# Altium footprint library WR-PHD_Socket Header_2.54mm.PcbLib: 187 footprints (part 4 of 12)
Each footprint in its own frame and in the unit in brackets; x right, y up, seen from the top. Pads: shape width x height; smd on the part's side, far side on the other; paste and mask are expansions set on the pad; w line width, h text height; cw(c..) or ccw(c..) is an arc to the next point about the centre after c.
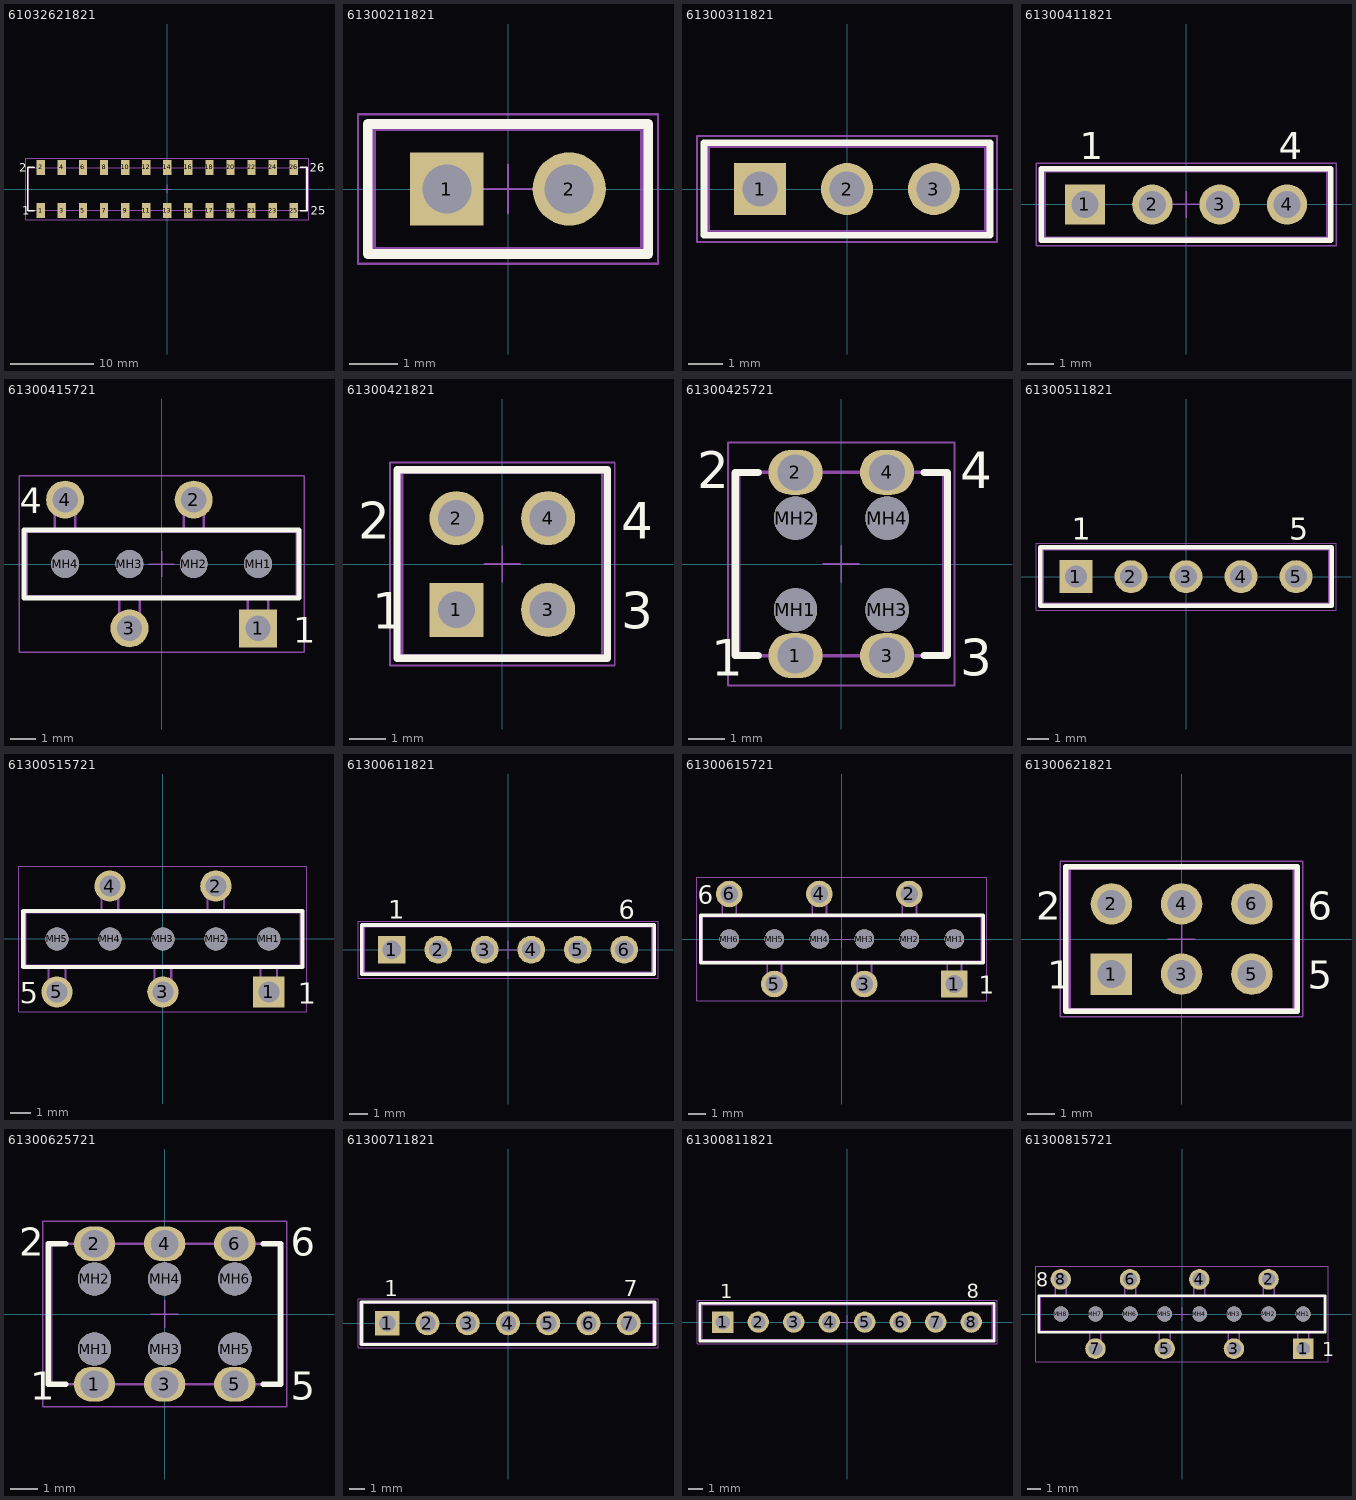
[diagram p3: the footprints below, top view; thin cyan lines are the x and y axes]

## 61032621821 [mm] "Socket Header, Pitch 2.54 mm, SMT, Vertical, dual row, 26p"
height 7.45
pads (26):
  rect 1x1.8 smd: 1(-15.24,-2.6) 2(-15.24,2.6) 3(-12.7,-2.6) 4(-12.7,2.6) 5(-10.16,-2.6) 6(-10.16,2.6) 7(-7.62,-2.6) 8(-7.62,2.6) 9(-5.08,-2.6) 10(-5.08,2.6) 11(-2.54,-2.6) 12(-2.54,2.6) 13(0,-2.6) 14(0,2.6) 15(2.54,-2.6) 16(2.54,2.6) 17(5.08,-2.6) 18(5.08,2.6) 19(7.62,-2.6) 20(7.62,2.6) 21(10.16,-2.6) 22(10.16,2.6) 23(12.7,-2.6) 24(12.7,2.6) 25(15.24,-2.6) 26(15.24,2.6)
Top Overlay:
  lines w0.2: -16.02,-2.615 -16.835,-2.615 -16.835,2.615 -16.02,2.615 ; 16.02,-2.615 16.835,-2.615 16.835,2.615 16.02,2.615
  text "2" at -17.87,2.1 h1.02
  text "1" at -17.47,-3.1 h1.02
  text "25" at 17.27,-3.1 h1.02
  text "26" at 17.17,2.1 h1.02
Mechanical 13:
  lines w0.1: -15.56,-2.54 -15.56,-3.35 -14.92,-3.35 -14.92,-2.54 ; -15.56,2.54 -15.56,3.35 -14.92,3.35 -14.92,2.54 ; -13.02,-2.54 -13.02,-3.35 -12.38,-3.35 -12.38,-2.54 ; -13.02,2.54 -13.02,3.35 -12.38,3.35 -12.38,2.54 ; -10.48,-2.54 -10.48,-3.35 -9.84,-3.35 -9.84,-2.54 ; -10.48,2.54 -10.48,3.35 -9.84,3.35 -9.84,2.54 ; -7.94,-2.54 -7.94,-3.35 -7.3,-3.35 -7.3,-2.54 ; -7.94,2.54 -7.94,3.35 -7.3,3.35 -7.3,2.54 ; -5.4,-2.54 -5.4,-3.35 -4.76,-3.35 -4.76,-2.54 ; -5.4,2.54 -5.4,3.35 -4.76,3.35 -4.76,2.54 ; -2.86,-2.54 -2.86,-3.35 -2.22,-3.35 -2.22,-2.54 ; -2.86,2.54 -2.86,3.35 -2.22,3.35 -2.22,2.54 ; -0.32,-2.54 -0.32,-3.35 0.32,-3.35 0.32,-2.54 ; -0.32,2.54 -0.32,3.35 0.32,3.35 0.32,2.54 ; 2.22,-2.54 2.22,-3.35 2.86,-3.35 2.86,-2.54 ; 2.22,2.54 2.22,3.35 2.86,3.35 2.86,2.54 ; 4.76,-2.54 4.76,-3.35 5.4,-3.35 5.4,-2.54 ; 4.76,2.54 4.76,3.35 5.4,3.35 5.4,2.54 ; 7.3,-2.54 7.3,-3.35 7.94,-3.35 7.94,-2.54 ; 7.3,2.54 7.3,3.35 7.94,3.35 7.94,2.54 ; 9.84,-2.54 9.84,-3.35 10.48,-3.35 10.48,-2.54 ; 9.84,2.54 9.84,3.35 10.48,3.35 10.48,2.54 ; 12.38,-2.54 12.38,-3.35 13.02,-3.35 13.02,-2.54 ; 12.38,2.54 12.38,3.35 13.02,3.35 13.02,2.54 ; 14.92,-2.54 14.92,-3.35 15.56,-3.35 15.56,-2.54 ; 14.92,2.54 14.92,3.35 15.56,3.35 15.56,2.54 ; -16.76,-2.54 -16.76,2.54 16.76,2.54 16.76,-2.54 -16.76,-2.54
Mechanical 15:
  lines w0.05: -0.5,0 0.5,0 ; 0,-0.5 0,0.5 ; -17.035,-3.7 17.035,-3.7 17.035,3.7 -17.035,3.7 -17.035,-3.7
3D body "61032621821.stp": height 8.52, standoff 0.02, extent -16.51,-3.35 16.51,3.35

## 61300211821 [mm] "Socket Header, Pitch 2.54 mm, THT, Vertical, single row, 2p"
height 8.5
pads (2):
  rect 1.52x1.52 hole 1.02: 1(-1.27,0)
  round 1.52 hole 1.02: 2(1.27,0)
Top Overlay:
  lines w0.2: -2.915,-1.35 -2.915,1.35 2.915,1.35 2.915,-1.35 -2.915,-1.35
Mechanical 13:
  lines w0.1: -2.79,-1.25 -2.79,1.25 2.79,1.25 2.79,-1.25 -2.79,-1.25
Mechanical 15:
  lines w0.05: -0.5,0 0.5,0 ; 0,-0.5 0,0.5 ; -3.115,-1.55 -3.115,1.55 3.115,1.55 3.115,-1.55 -3.115,-1.55
3D body "61300211821.stp": height 8.55, standoff -3.06, extent -2.79,-1.25 2.79,1.25

## 61300311821 [mm] "Socket Header, Pitch 2.54 mm, THT, Vertical, single row, 3p"
height 8.5
pads (3):
  rect 1.52x1.52 hole 1.02: 1(-2.54,0)
  round 1.52 hole 1.02: 2(0,0) 3(2.54,0)
Top Overlay:
  lines w0.2: -4.185,-1.35 -4.185,1.35 4.185,1.35 4.185,-1.35 -4.185,-1.35
Mechanical 13:
  lines w0.1: -4.06,-1.25 -4.06,1.25 4.06,1.25 4.06,-1.25 -4.06,-1.25
Mechanical 15:
  lines w0.05: -0.5,0 0.5,0 ; 0,-0.5 0,0.5 ; -4.385,-1.55 -4.385,1.55 4.385,1.55 4.385,-1.55 -4.385,-1.55
3D body "61300311821.stp": height 8.55, standoff -3.06, extent -4.06,-1.25 4.06,1.25

## 61300411821 [mm] "Socket Header, Pitch 2.54 mm, THT, Vertical, single row, 4p"
height 8.5
pads (4):
  rect 1.52x1.52 hole 1.02: 1(-3.81,0)
  round 1.52 hole 1.02: 2(-1.27,0) 3(1.27,0) 4(3.81,0)
Top Overlay:
  lines w0.2: -5.455,-1.35 5.455,-1.35 5.455,1.35 -5.455,1.35 -5.455,-1.35
  text "4" at 3.5,1.7 h1.02
  text "1" at -4,1.7 h1.02
Mechanical 13:
  lines w0.1: -5.33,-1.25 5.33,-1.25 5.33,1.25 -5.33,1.25 -5.33,-1.25
Mechanical 15:
  lines w0.05: -0.5,0 0.5,0 ; 0,-0.5 0,0.5 ; -5.655,-1.55 5.655,-1.55 5.655,1.55 -5.655,1.55 -5.655,-1.55
3D body "61300411821.stp": height 8.55, standoff -3.05, extent -5.33,-1.25 5.33,1.25

## 61300415721 [mm] "Socket Header, Pitch 2.54 mm, THT, Vertical, single row, 4p"
height 5
pads (8):
  rect 1.5x1.5 hole 1: 1(3.81,-2.54)
  round 1.5 hole 1: 2(1.27,2.54) 3(-1.27,-2.54) 4(-3.81,2.54)
  round 1.1 hole 1.1 unplated: MH1(3.81,0) MH2(1.27,0) MH3(-1.27,0) MH4(-3.81,0)
Top Overlay:
  lines w0.2: -5.43,-1.345 -5.43,1.345 5.43,1.345 5.43,-1.345 -5.43,-1.345
  text "4" at -5.6,2 h1.02
  text "1" at 5.2,-3.1 h1.02
Mechanical 13:
  lines w0.1: -4.21,1.27 -4.21,2.665 -3.41,2.665 -3.41,1.27 ; -1.67,-1.27 -1.67,-2.665 -0.87,-2.665 -0.87,-1.27 ; 0.87,1.27 0.87,2.665 1.67,2.665 1.67,1.27 ; 3.41,-1.27 3.41,-2.665 4.21,-2.665 4.21,-1.27 ; -5.33,-1.27 -5.33,1.27 5.33,1.27 5.33,-1.27 -5.33,-1.27
Mechanical 15:
  lines w0.05: -0.5,0 0.5,0 ; 0,-0.5 0,0.5 ; -5.63,-3.49 5.63,-3.49 5.63,3.49 -5.63,3.49 -5.63,-3.49
3D body "61300415721.stp": height 5.17, standoff -2.93, extent -5.38,-2.665 5.38,2.665

## 61300421821 [mm] "Socket Header, Pitch 2.54 mm, THT, Vertical, dual row, 4p"
height 8.4
pads (4):
  rect 1.5x1.5 hole 1.02: 1(-1.27,-1.27)
  round 1.5 hole 1.02: 2(-1.27,1.27) 3(1.27,-1.27) 4(1.27,1.27)
Top Overlay:
  lines w0.2: -2.915,-2.615 -2.915,2.615 2.915,2.615 2.915,-2.615 -2.915,-2.615
  text "4" at 3.3,0.7 h1.02
  text "2" at -4,0.7 h1.02
  text "3" at 3.3,-1.8 h1.02
  text "1" at -3.6,-1.8 h1.02
Mechanical 13:
  lines w0.1: -2.79,-2.54 2.79,-2.54 2.79,2.54 -2.79,2.54 -2.79,-2.54
Mechanical 15:
  lines w0.05: -0.5,0 0.5,0 ; 0,-0.5 0,0.5 ; -3.115,-2.815 3.115,-2.815 3.115,2.815 -3.115,2.815 -3.115,-2.815
3D body "61300421821.stp": height 8.45, standoff -3.05, extent -2.79,-2.54 2.79,2.54

## 61300425721 [mm] "Dual Socket Header Bottom Entry, pitch 2.54mm, 4p"
height 5
pads (8):
  oval 1.5x1.25 hole 1: 1(-1.27,-2.54) 2(-1.27,2.54) 3(1.27,-2.54) 4(1.27,2.54)
  round 1.2 hole 1.2 unplated: MH1(-1.27,-1.27) MH2(-1.27,1.27) MH3(1.27,-1.27) MH4(1.27,1.27)
Top Overlay:
  lines w0.2: -2.3,-2.54 -2.94,-2.54 -2.94,2.54 -2.3,2.54 ; 2.3,-2.54 2.94,-2.54 2.94,2.54 2.3,2.54
  text "2" at -4,2.1 h1.02
  text "4" at 3.3,2.1 h1.02
  text "3" at 3.3,-3.1 h1.02
  text "1" at -3.6,-3.1 h1.02
Mechanical 13:
  lines w0.1: -2.84,-2.54 2.84,-2.54 2.84,2.54 -2.84,2.54 -2.84,-2.54
Mechanical 15:
  lines w0.05: -0.5,0 0.5,0 ; 0,-0.5 0,0.5 ; -3.14,-3.365 -3.14,3.365 3.14,3.365 3.14,-3.365 -3.14,-3.365
3D body "61300425721.stp": height 5.05, standoff -3.05, extent -2.84,-2.665 2.84,2.665

## 61300511821 [mm] "Socket Header, Pitch 2.54 mm, THT, Vertical, single row, 5p"
height 8.5
pads (5):
  rect 1.52x1.52 hole 1.02: 1(-5.08,0)
  round 1.52 hole 1.02: 2(-2.54,0) 3(0,0) 4(2.54,0) 5(5.08,0)
Top Overlay:
  lines w0.2: -6.725,-1.35 6.725,-1.35 6.725,1.35 -6.725,1.35 -6.725,-1.35
  text "5" at 4.77,1.7 h1.02
  text "1" at -5.27,1.7 h1.02
Mechanical 13:
  lines w0.1: -6.6,-1.25 6.6,-1.25 6.6,1.25 -6.6,1.25 -6.6,-1.25
Mechanical 15:
  lines w0.05: -0.5,0 0.5,0 ; 0,-0.5 0,0.5 ; -6.925,-1.55 6.925,-1.55 6.925,1.55 -6.925,1.55 -6.925,-1.55
3D body "61300511821.stp": height 8.55, standoff -3.06, extent -6.6,-1.25 6.6,1.25

## 61300515721 [mm] "Socket Header, Pitch 2.54 mm, THT, Vertical, single row, 5p"
height 5
pads (10):
  rect 1.5x1.5 hole 1: 1(5.08,-2.54)
  round 1.5 hole 1: 2(2.54,2.54) 3(0,-2.54) 4(-2.54,2.54) 5(-5.08,-2.54)
  round 1.1 hole 1.1 unplated: MH1(5.08,0) MH2(2.54,0) MH3(0,0) MH4(-2.54,0) MH5(-5.08,0)
Top Overlay:
  lines w0.2: -6.7,-1.345 -6.7,1.345 6.7,1.345 6.7,-1.345 -6.7,-1.345
  text "5" at -6.87,-3.08 h1.02
  text "1" at 6.47,-3.1 h1.02
Mechanical 13:
  lines w0.1: -5.48,-1.27 -5.48,-2.665 -4.68,-2.665 -4.68,-1.27 ; -2.94,1.27 -2.94,2.665 -2.14,2.665 -2.14,1.27 ; -0.4,-1.27 -0.4,-2.665 0.4,-2.665 0.4,-1.27 ; 2.14,1.27 2.14,2.665 2.94,2.665 2.94,1.27 ; 4.68,-1.27 4.68,-2.665 5.48,-2.665 5.48,-1.27 ; -6.6,-1.27 -6.6,1.27 6.6,1.27 6.6,-1.27 -6.6,-1.27
Mechanical 15:
  lines w0.05: -0.5,0 0.5,0 ; 0,-0.5 0,0.5 ; -6.9,-3.49 6.9,-3.49 6.9,3.49 -6.9,3.49 -6.9,-3.49
3D body "61300515721.stp": height 5.17, standoff -2.93, extent -6.65,-2.665 6.65,2.665

## 61300611821 [mm] "Socket Header, Pitch 2.54 mm, THT, Vertical, single row, 6p"
height 8.5
pads (6):
  rect 1.52x1.52 hole 1.02: 1(-6.35,0)
  round 1.52 hole 1.02: 2(-3.81,0) 3(-1.27,0) 4(1.27,0) 5(3.81,0) 6(6.35,0)
Top Overlay:
  lines w0.2: -7.995,-1.35 7.995,-1.35 7.995,1.35 -7.995,1.35 -7.995,-1.35
  text "6" at 6.04,1.7 h1.02
  text "1" at -6.54,1.7 h1.02
Mechanical 13:
  lines w0.1: -7.87,-1.25 7.87,-1.25 7.87,1.25 -7.87,1.25 -7.87,-1.25
Mechanical 15:
  lines w0.05: -0.5,0 0.5,0 ; 0,-0.5 0,0.5 ; -8.195,-1.55 8.195,-1.55 8.195,1.55 -8.195,1.55 -8.195,-1.55
3D body "61300611821.stp": height 8.55, standoff -3.06, extent -7.87,-1.25 7.87,1.25

## 61300615721 [mm] "Socket Header, Pitch 2.54 mm, THT, Vertical, single row, 6p"
height 5
pads (12):
  rect 1.5x1.5 hole 1: 1(6.35,-2.54)
  round 1.5 hole 1: 2(3.81,2.54) 3(1.27,-2.54) 4(-1.27,2.54) 5(-3.81,-2.54) 6(-6.35,2.54)
  round 1.1 hole 1.1 unplated: MH1(6.35,0) MH2(3.81,0) MH3(1.27,0) MH4(-1.27,0) MH5(-3.81,0) MH6(-6.35,0)
Top Overlay:
  lines w0.2: -7.97,-1.345 -7.97,1.345 7.97,1.345 7.97,-1.345 -7.97,-1.345
  text "6" at -8.14,2 h1.02
  text "1" at 7.74,-3.1 h1.02
Mechanical 13:
  lines w0.1: -6.75,1.27 -6.75,2.665 -5.95,2.665 -5.95,1.27 ; -4.21,-1.27 -4.21,-2.665 -3.41,-2.665 -3.41,-1.27 ; -1.67,1.27 -1.67,2.665 -0.87,2.665 -0.87,1.27 ; 0.87,-1.27 0.87,-2.665 1.67,-2.665 1.67,-1.27 ; 3.41,1.27 3.41,2.665 4.21,2.665 4.21,1.27 ; 5.95,-1.27 5.95,-2.665 6.75,-2.665 6.75,-1.27 ; -7.87,-1.27 -7.87,1.27 7.87,1.27 7.87,-1.27 -7.87,-1.27
Mechanical 15:
  lines w0.05: -0.5,0 0.5,0 ; 0,-0.5 0,0.5 ; -8.17,-3.49 8.17,-3.49 8.17,3.49 -8.17,3.49 -8.17,-3.49
3D body "61300615721.stp": height 5.17, standoff -2.93, extent -7.92,-2.665 7.92,2.665

## 61300621821 [mm] "Socket Header, Pitch 2.54 mm, THT, Vertical, dual row, 6p"
height 8.4
pads (6):
  rect 1.5x1.5 hole 1.02: 1(-2.54,-1.27)
  round 1.5 hole 1.02: 2(-2.54,1.27) 3(0,-1.27) 4(0,1.27) 5(2.54,-1.27) 6(2.54,1.27)
Top Overlay:
  lines w0.2: -4.185,-2.615 4.185,-2.615 4.185,2.615 -4.185,2.615 -4.185,-2.615
  text "1" at -4.87,-1.8 h1.02
  text "2" at -5.27,0.7 h1.02
  text "6" at 4.57,0.7 h1.02
  text "5" at 4.57,-1.8 h1.02
Mechanical 13:
  lines w0.1: -4.06,-2.54 -4.06,2.54 4.06,2.54 4.06,-2.54 -4.06,-2.54
Mechanical 15:
  lines w0.05: -0.5,0 0.5,0 ; 0,-0.5 0,0.5 ; -4.385,-2.815 -4.385,2.815 4.385,2.815 4.385,-2.815 -4.385,-2.815
3D body "61300621821.stp": height 8.45, standoff -3.05, extent -4.06,-2.54 4.06,2.54

## 61300625721 [mm] "Dual Socket Header Bottom Entry, pitch 2.54mm, 6p"
height 5
pads (12):
  oval 1.5x1.25 hole 1: 1(-2.54,-2.54) 2(-2.54,2.54) 3(0,-2.54) 4(0,2.54) 5(2.54,-2.54) 6(2.54,2.54)
  round 1.2 hole 1.2 unplated: MH1(-2.54,-1.27) MH2(-2.54,1.27) MH3(0,-1.27) MH4(0,1.27) MH5(2.54,-1.27) MH6(2.54,1.27)
Top Overlay:
  lines w0.2: -3.57,-2.54 -4.21,-2.54 -4.21,2.54 -3.57,2.54 ; 3.57,-2.54 4.21,-2.54 4.21,2.54 3.57,2.54
  text "2" at -5.27,2.1 h1.02
  text "1" at -4.87,-3.1 h1.02
  text "5" at 4.57,-3.1 h1.02
  text "6" at 4.57,2.1 h1.02
Mechanical 13:
  lines w0.1: -4.11,-2.54 4.11,-2.54 4.11,2.54 -4.11,2.54 -4.11,-2.54
Mechanical 15:
  lines w0.05: -0.5,0 0.5,0 ; 0,-0.5 0,0.5 ; -4.41,-3.365 -4.41,3.365 4.41,3.365 4.41,-3.365 -4.41,-3.365
3D body "61300625721.stp": height 5.05, standoff -3.05, extent -4.11,-2.665 4.11,2.665

## 61300711821 [mm] "Socket Header, Pitch 2.54 mm, THT, Vertical, single row, 7p"
height 8.5
pads (7):
  rect 1.52x1.52 hole 1.02: 1(-7.62,0)
  round 1.52 hole 1.02: 2(-5.08,0) 3(-2.54,0) 4(0,0) 5(2.54,0) 6(5.08,0) 7(7.62,0)
Top Overlay:
  lines w0.2: -9.265,-1.35 -9.265,1.35 9.265,1.35 9.265,-1.35 -9.265,-1.35
  text "1" at -7.81,1.7 h1.02
  text "7" at 7.31,1.7 h1.02
Mechanical 13:
  lines w0.1: -9.14,-1.25 -9.14,1.25 9.14,1.25 9.14,-1.25 -9.14,-1.25
Mechanical 15:
  lines w0.05: -0.5,0 0.5,0 ; 0,-0.5 0,0.5 ; -9.465,-1.55 -9.465,1.55 9.465,1.55 9.465,-1.55 -9.465,-1.55
3D body "61300711821.stp": height 8.55, standoff -3.06, extent -9.14,-1.25 9.14,1.25

## 61300811821 [mm] "Socket Header, Pitch 2.54 mm, THT, Vertical, single row, 8p"
height 8.5
pads (8):
  rect 1.52x1.52 hole 1.02: 1(-8.89,0)
  round 1.52 hole 1.02: 2(-6.35,0) 3(-3.81,0) 4(-1.27,0) 5(1.27,0) 6(3.81,0) 7(6.35,0) 8(8.89,0)
Top Overlay:
  lines w0.2: -10.535,-1.35 10.535,-1.35 10.535,1.35 -10.535,1.35 -10.535,-1.35
  text "1" at -9.08,1.7 h1.02
  text "8" at 8.58,1.7 h1.02
Mechanical 13:
  lines w0.1: -10.41,-1.25 10.41,-1.25 10.41,1.25 -10.41,1.25 -10.41,-1.25
Mechanical 15:
  lines w0.05: -0.5,0 0.5,0 ; 0,-0.5 0,0.5 ; -10.735,-1.55 10.735,-1.55 10.735,1.55 -10.735,1.55 -10.735,-1.55
3D body "61300811821.stp": height 8.55, standoff -3.06, extent -10.41,-1.25 10.41,1.25

## 61300815721 [mm] "Socket Header, Pitch 2.54 mm, THT, Vertical, single row, 8p"
height 5
pads (16):
  rect 1.5x1.5 hole 1: 1(8.89,-2.54)
  round 1.5 hole 1: 2(6.35,2.54) 3(3.81,-2.54) 4(1.27,2.54) 5(-1.27,-2.54) 6(-3.81,2.54) 7(-6.35,-2.54) 8(-8.89,2.54)
  round 1.1 hole 1.1 unplated: MH1(8.89,0) MH2(6.35,0) MH3(3.81,0) MH4(1.27,0) MH5(-1.27,0) MH6(-3.81,0) MH7(-6.35,0) MH8(-8.89,0)
Top Overlay:
  lines w0.2: -10.51,-1.345 10.51,-1.345 10.51,1.345 -10.51,1.345 -10.51,-1.345
  text "8" at -10.68,2 h1.02
  text "1" at 10.28,-3.1 h1.02
Mechanical 13:
  lines w0.1: -9.29,1.27 -9.29,2.665 -8.49,2.665 -8.49,1.27 ; -6.75,-1.27 -6.75,-2.665 -5.95,-2.665 -5.95,-1.27 ; -4.21,1.27 -4.21,2.665 -3.41,2.665 -3.41,1.27 ; -1.67,-1.27 -1.67,-2.665 -0.87,-2.665 -0.87,-1.27 ; 0.87,1.27 0.87,2.665 1.67,2.665 1.67,1.27 ; 3.41,-1.27 3.41,-2.665 4.21,-2.665 4.21,-1.27 ; 5.95,1.27 5.95,2.665 6.75,2.665 6.75,1.27 ; 8.49,-1.27 8.49,-2.665 9.29,-2.665 9.29,-1.27 ; -10.41,-1.27 10.41,-1.27 10.41,1.27 -10.41,1.27 -10.41,-1.27
Mechanical 15:
  lines w0.05: -0.5,0 0.5,0 ; 0,-0.5 0,0.5 ; -10.71,-3.49 -10.71,3.49 10.71,3.49 10.71,-3.49 -10.71,-3.49
3D body "61300815721.stp": height 5.17, standoff -2.93, extent -10.46,-2.665 10.46,2.665